# Altium footprint library XM_Power_Passives.PcbLib: 4 footprints
Each footprint in its own frame and in the unit in brackets; x right, y up, seen from the top. Pads: shape width x height; smd on the part's side, far side on the other; paste and mask are expansions set on the pad; w line width, h text height; cw(c..) or ccw(c..) is an arc to the next point about the centre after c.
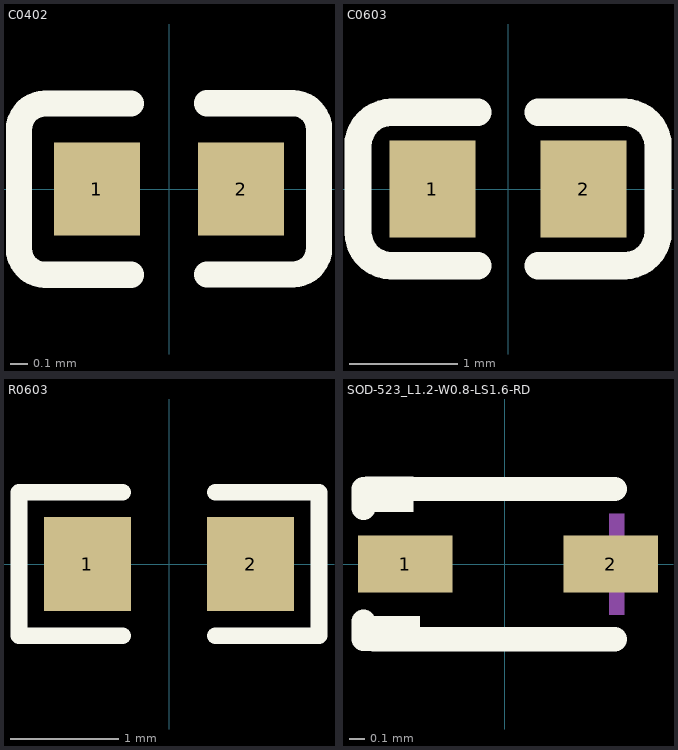
[diagram p0: the footprints below, top view; thin cyan lines are the x and y axes]

## C0402 [mm]
pads (2):
  rect 0.5x0.54 smd paste+0 mask+0.051: 1(-0.42,0) 2(0.42,0)
Top Overlay:
  lines w0.152: -0.221,-0.5 -0.721,-0.5 cw(c-0.721,-0.347) -0.874,-0.347 -0.874,0.345 cw(c-0.721,0.345) -0.721,0.498 -0.221,0.498 ; 0.221,-0.497 0.721,-0.497 ccw(c0.721,-0.345) 0.874,-0.345 0.874,0.347 ccw(c0.721,0.347) 0.721,0.5 0.221,0.5
3D body "C915853-32fe2cf9314f444ca2785a33c2db7189.step": height 0.25, standoff -0.25, extent -0.5,-0.25 0.5,0.25

## C0603 [mm]
pads (2):
  rect 0.8x0.9 smd paste+0 mask+0.051: 1(-0.7,0) 2(0.7,0)
Top Overlay:
  lines w0.254: -0.28,-0.71 -1.08,-0.71 cw(c-1.08,-0.4) -1.39,-0.4 -1.39,0.4 cw(c-1.08,0.4) -1.08,0.71 -0.28,0.71 ; 0.28,-0.71 1.08,-0.71 ; 0.28,0.71 1.08,0.71 ; 1.08,-0.71 ccw(c1.08,-0.4) 1.39,-0.4 1.39,0.4 ccw(c1.08,0.4) 1.08,0.71
3D body "C525264-ac9b32e974bc448eab36b1293f859dcb.step": height 0.4, standoff -0.4, extent -0.8,-0.4 0.8,0.4

## R0603 [mm]
pads (2):
  rect 0.806x0.864 smd paste-100 mask+0.051: 1(-0.753,0) 2(0.753,0)
Top Overlay:
  lines w0.152: -0.426,-0.661 -1.385,-0.661 -1.385,0.661 -0.426,0.661 ; 0.426,-0.661 1.385,-0.661 1.385,0.661 0.426,0.661
Top Paste:
  region: -1.195,-0.45 -0.395,-0.45 -0.345,-0.4 -0.345,-0.172 -0.715,-0.172 -0.715,0.158 -0.345,0.158 -0.345,0.4 -0.395,0.45 -1.195,0.45 -1.245,0.4 -1.245,-0.4
  region: 1.195,0.45 0.395,0.45 0.345,0.4 0.345,0.172 0.715,0.172 0.715,-0.158 0.345,-0.158 0.345,-0.4 0.395,-0.45 1.195,-0.45 1.245,-0.4 1.245,0.4
3D body "C22369799-6bd5cd867e9542ebae21caaf5d2d4c4d.step": height 0.44, standoff -0.01, extent -0.81,-0.41 0.81,0.4

## SOD-523_L1.2-W0.8-LS1.6-RD [mm]
pads (2):
  rect 0.6x0.36 smd paste+0 mask+0.051: 1(-0.63,0) 2(0.67,0)
Top Overlay:
  region: -0.58,0.552 -0.58,0.332 -0.885,0.332 -0.885,0.552
  region: -0.539,-0.552 -0.539,-0.332 -0.844,-0.332 -0.844,-0.552
  lines w0.152: -0.894,-0.363 -0.894,-0.476 -0.656,-0.476 ; -0.894,0.356 -0.894,0.476 -0.656,0.476 0.696,0.476 ; -0.656,-0.476 0.696,-0.476
Mechanical 15:
  region: -0.867,0.055 -0.867,-0.041 -0.483,-0.041 -0.483,0.055
  region: 0.9,0.048 0.9,-0.048 0.516,-0.048 0.516,0.048
  region: 0.756,0.32 0.756,-0.32 0.66,-0.32 0.66,0.32
3D body "C3008119-1b4f85e18594402ead7ab158b0198846.step": height 0, standoff -0.71, extent -0.567,-0.389 1.033,0.411